# Altium schematic symbol library BQ51003YFPT.SchLib: 1 symbol
Pins are listed as number, name and electrical type; pins without a type are passive.

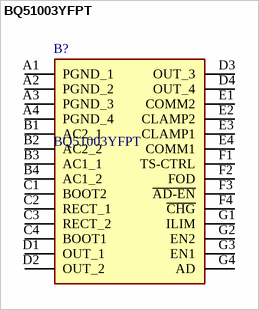
[diagram p0: symbol BQ51003YFPT]

## BQ51003YFPT
designator B?
BQ51003 Wireless Power Receiver; Manufacturer_Name: Texas Instruments; Geometry.Height: 0.5mm; Mouser Part Number: 595-BQ51003YFPT; Mouser Price/Stock: https://www.mouser.co.uk/ProductDetail/Texas-Instruments/BQ51003YFPT?qs=QCUnHQQYO1rX6GZ4rUhwCg%3D%3D; Manufacturer_Part_Number: BQ51003YFPT; Datasheet Link: http://www.ti.com/lit/gpn/BQ51003
footprint BGA28C40P4X7_188X301X50
pins: A1 PGND_1, A2 PGND_2, A3 PGND_3, A4 PGND_4, B1 AC2_1, B2 AC2_2, B3 AC1_1, B4 AC1_2, C1 BOOT2, C2 RECT_1, C3 RECT_2, C4 BOOT1, D1 OUT_1, D2 OUT_2, D3 OUT_3, D4 OUT_4, E1 COMM2, E2 CLAMP2, E3 CLAMP1, E4 COMM1, F1 TS-CTRL, F2 FOD, F3 ~{AD-EN}, F4 ~{CHG}, G1 ILIM, G2 EN2, G3 EN1, G4 AD